# Altium schematic symbol library BAT64-06-TP.SchLib: 1 symbol
Pins are listed as number, name and electrical type; pins without a type are passive.

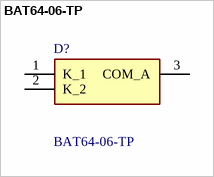
[diagram p0: symbol BAT64-06-TP]

## BAT64-06-TP
designator D?
Small Signal Schottky Diodes; Manufacturer_Name: MCC; Geometry.Height: 1.25mm; Manufacturer_Part_Number: BAT64-06-TP; Mouser Part Number: 833-BAT64-06-TP; Mouser Price/Stock: https://www.mouser.co.uk/ProductDetail/Micro-Commercial-Components-MCC/BAT64-06-TP?qs=P1JMDcb91o7M%252BqFkYWXryg%3D%3D; Arrow Part Number: *; Arrow Price/Stock: *; Datasheet Link: https://www.mccsemi.com/pdf/Products/BAT64-04~06(SOT-23).pdf
footprint SOT95P237X125-3N
pins: 1 K_1, 2 K_2, 3 COM_A